# Altium footprint library Other.PcbLib: 1 footprints
Each footprint in its own frame and in the unit in brackets; x right, y up, seen from the top. Pads: shape width x height; smd on the part's side, far side on the other; paste and mask are expansions set on the pad; w line width, h text height; cw(c..) or ccw(c..) is an arc to the next point about the centre after c.
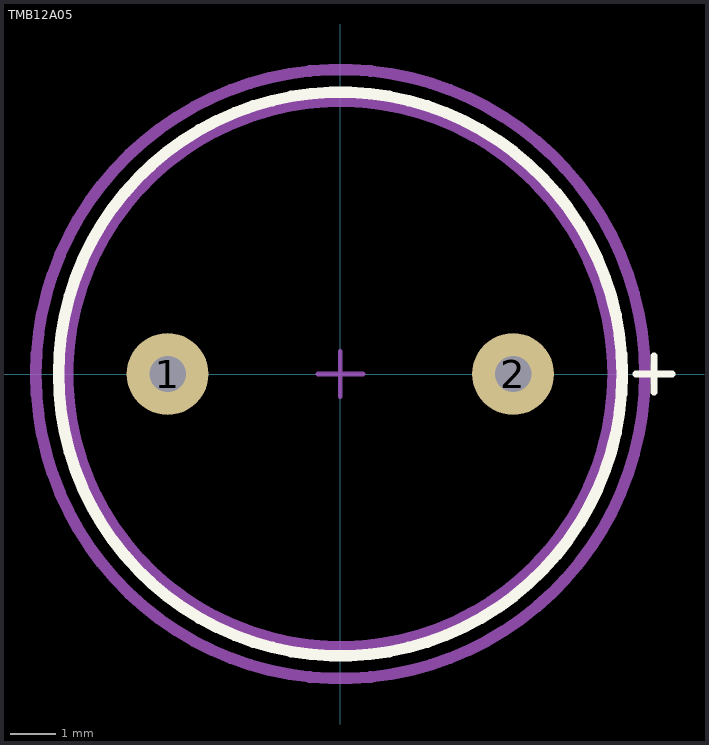
[diagram p0: the footprint, top view; thin cyan lines are the x and y axes]

## TMB12A05 [mm] "Buzzer 12mm, 2 pads, THT, 7.6mm pin spacing"
pads (2):
  round 1.8 hole 0.8: 1(-3.8,0) 2(3.8,0)
Top Overlay:
  circle w0.254: c0,0 r6.2
  lines w0.15: 6.5,0 7.3,0 ; 6.9,-0.4 6.9,0.4
Mechanical 13:
  circle w0.254: c0,0 r6.001
Mechanical 15:
  circle w0.254: c0,0 r6.7
  lines w0.1: -0.5,0 0.5,0 ; 0,-0.5 0,0.5
3D body: height 9.5, standoff 0, extent -6,-6 6,6